# Altium schematic symbol library MF-LSMF300_24X-2.SchLib: 1 symbol
Pins are listed as number, name and electrical type; pins without a type are passive.

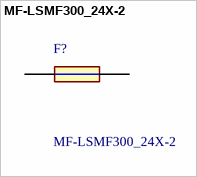
[diagram p0: symbol MF-LSMF300_24X-2]

## MF-LSMF300_24X-2
designator F?
PTC - (2920)SURFACE MNT Bourns 3A Surface Mount Resettable Fuse, 24 V; Manufacturer_Part_Number: MF-LSMF300/24X-2; Geometry.Height: 1.6mm; Mouser Part Number: 652-MF-LSMF300/24X-2; Mouser Price/Stock: https://www.mouser.co.uk/ProductDetail/Bourns/MF-LSMF300-24X-2?qs=LaERWbmZ8SQFElU5s8JsYg%3D%3D; Manufacturer_Name: Bourns; Datasheet Link: https://www.bourns.com/docs/Product-Datasheets/mflsmf.pdf
footprint FUSC7451X160N
pins: 1, 2